# EAGLE library part TJA1441AT_0Z (library TJA1441AT_0Z)
High-speed CAN transceiver Source: Datasheet <https://www.mouser.it/datasheet/2/302/TJA1441-1949304.pdf>
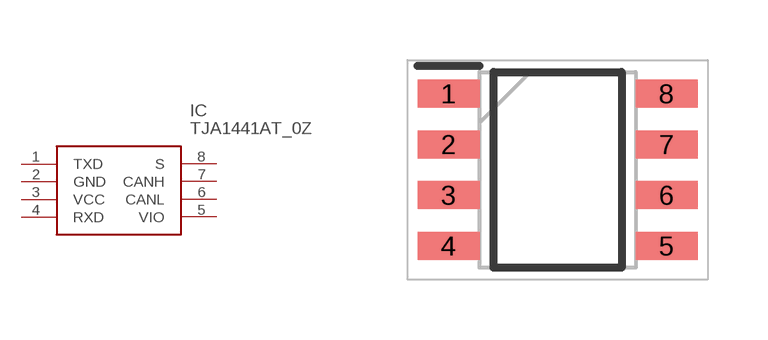
[diagram p0: symbol with the pads of SOIC127P600X175-8N; footprint SOIC127P600X175-8N]

Designator prefix IC

## TJA1441AT_0Z (Description: High-speed CAN transceiver; Height: 1.75mm; Manufacturer_Name: NXP; Manufacturer_Part_Number: TJA1441AT/0Z; Mouser_Part_Number: 771-TJA1441AT/0Z; Mouser_Price-Stock: https://www.mouser.co.uk/ProductDetail/NXP-Semiconductors/TJA1441AT-0Z?qs=eP2BKZSCXI7fcqmlBnmIFw%3D%3D)  [SOIC127P600X175-8N]
1  TXD
2  GND
3  VCC
4  RXD
5  VIO
6  CANL
7  CANH
8  S

## Footprint SOIC127P600X175-8N (pad centres in mm)
SO8(1.75)
smd 1.55 x 0.7: 1 -2.725,1.905; 2 -2.725,0.635; 3 -2.725,-0.635; 4 -2.725,-1.905; 5 2.725,-1.905; 6 2.725,-0.635; 7 2.725,0.635; 8 2.725,1.905